# Altium schematic symbol library TPS51388VABR.SchLib: 1 symbol
Pins are listed as number, name and electrical type; pins without a type are passive.

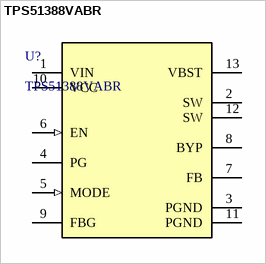
[diagram p0: symbol TPS51388VABR]

## TPS51388VABR
designator U?
4.5-V to 24-V input, 12-A synchronous buck converter with adjustable output 13-VQFN-HR -40 to 125; Manufacturer_Name: Texas Instruments; TYPE: TYPE; RefDes: RefDes; Copyright: Copyright (C) 2025 Ultra Librarian. All rights reserved.; Manufacturer_Part_Number: TPS51388VABR; Supplier 1: Mouser; Supplier Part Number 1: 595-TPS51388VABR
footprint VAB0013A-MFG
pins: 1 VIN (power), 2 SW, 3 PGND (power), 4 PG (oc), 5 MODE (in), 6 EN (in), 7 FB, 8 BYP, 9 FBG, 10 VCC (power), 11 PGND (power), 12 SW, 13 VBST